# Altium schematic symbol library Misc_custom.SchLib: 13 symbols
Pins are listed as number, name and electrical type; pins without a type are passive.

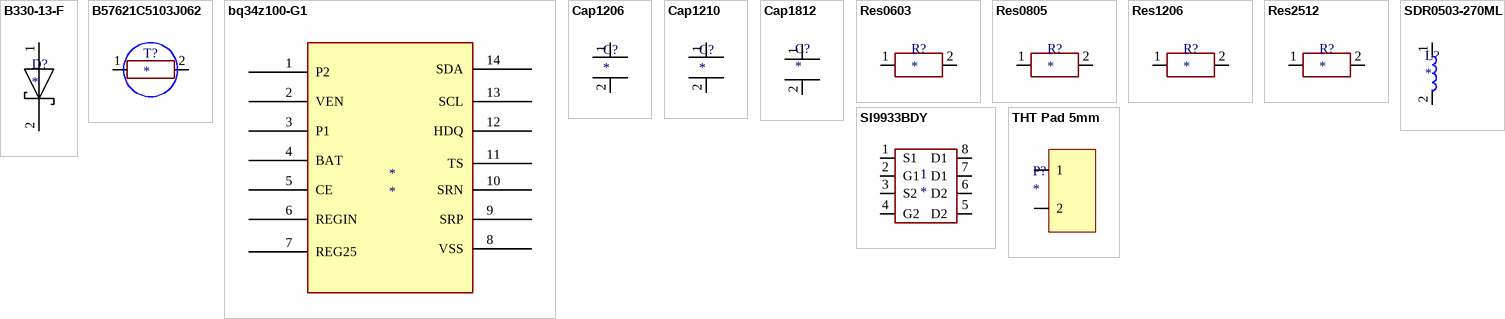
[diagram p0: symbols B330-13-F to THT Pad 5mm]

## B330-13-F
designator D?
footprint B330-13-F
pins: 1, 2

## B57621C5103J062
designator T?
footprint Therm1206
pins: 1, 2

## bq34z100-G1
designator *
footprint bq34z100-G1
pins: 1 P2, 2 VEN, 3 P1, 4 BAT, 5 CE, 6 REGIN, 7 REG25, 8 VSS, 9 SRP, 10 SRN, 11 TS, 12 HDQ, 13 SCL, 14 SDA

## Cap1206
designator C?
footprint CAP1206
pins: 1, 2

## Cap1210
designator C?
footprint Сap1210
pins: 1, 2

## Cap1812
designator C?
footprint CAP1812
pins: 1, 2

## Res0603
designator R?
footprint RES0603
pins: 1, 2

## Res0805
designator R?
footprint RES0805
pins: 1, 2

## Res1206
designator R?
footprint RES1206
pins: 1, 2

## Res2512
designator R?
footprint Res2512
pins: 1, 2

## SDR0503-270ML
designator L?
footprint SDR0503
pins: 1, 2

## SI9933BDY
designator 1
footprint JEDEC MS-012.AA
pins: 1 S1, 2 G1, 3 S2, 4 G2, 5 D2, 6 D2, 7 D1, 8 D1

## THT Pad 5mm
designator P?
footprint THT Pad 5mm
pins: 1, 2